# Altium schematic symbol library Altium_Library.SchLib: 822 symbols (part 15 of 17)
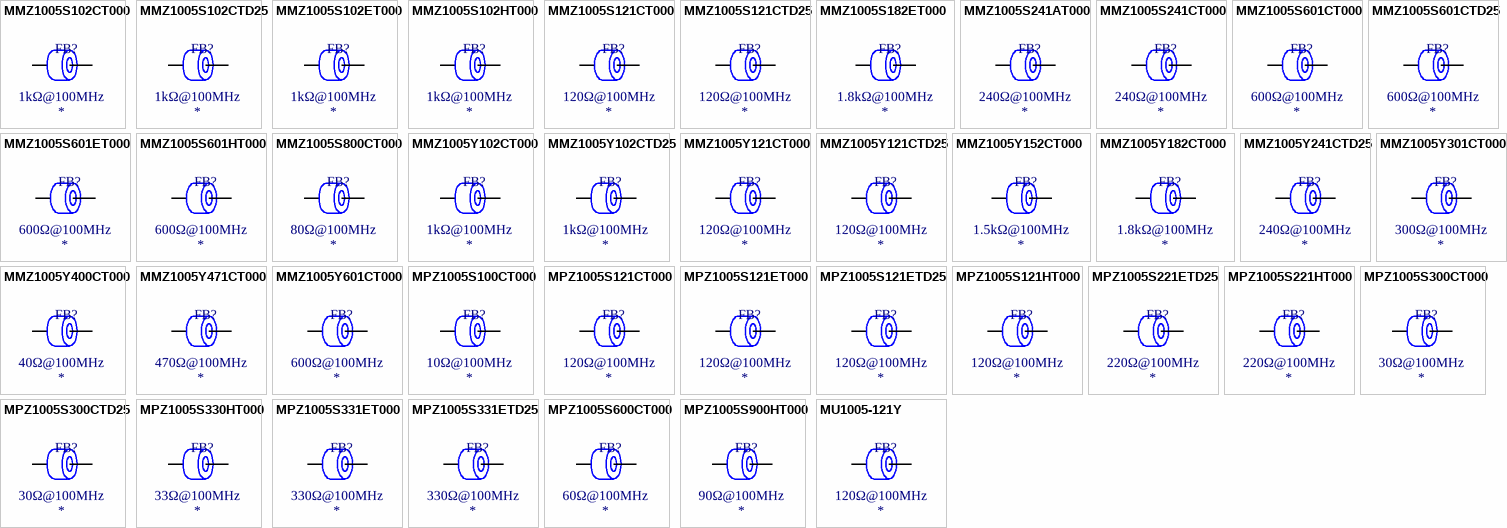
[diagram p34: symbols MMZ1005S102CT000 to MU1005-121Y]

## MMZ1005Y601CT000
designator FB?  Impedance @ Frequency: 600Ω@100MHz
Ferrite, 600Ω@100MHz, ±25%, 540mΩ, 250mA, SMD 0402; Manufacturer: TDK; Manufacturer Part Number: MMZ1005Y601CT000; Package Size: 0402; JLCPCB Basic Part: No; JLCPCB Part Number: C87552; Supplier 1: LCSC; Category: Ferrite Beads; Supplier Part Number 1: C87552; Tolerance: ±25%; Rated Current: 250mA; DC Resistance: 540mΩ; RoHS: Yes; ComponentLink1Description: Datasheet; ComponentLink1URL: https://wmsc.lcsc.com/wmsc/upload/file/pdf/v2/lcsc/2304140030_TDK-MMZ1005Y601CT000_C87552.pdf; ComponentLink2Description: JLCPCB Part URL; ComponentLink2URL: https://jlcpcb.com/partdetail/C87552; ComponentLink3Description: LCSC Part URL; ComponentLink3URL: https://lcsc.com/product-detail/Ferrite-Beads_TDK-TDK-MMZ1005Y601CT000_C87552.html
footprint FB-0402 (0402 (1005M) Ferrite)
pins: 1, 2

## MPZ1005S100CT000
designator FB?  Impedance @ Frequency: 10Ω@100MHz
Ferrite, 10Ω@100MHz, 25mΩ, 3A, SMD 0402; Manufacturer: TDK; Manufacturer Part Number: MPZ1005S100CT000; Package Size: 0402; JLCPCB Basic Part: No; JLCPCB Part Number: C275476; Supplier 1: LCSC; Category: Ferrite Beads; Supplier Part Number 1: C275476; Rated Current: 3A; DC Resistance: 25mΩ; RoHS: Yes; ComponentLink1Description: Datasheet; ComponentLink1URL: https://wmsc.lcsc.com/wmsc/upload/file/pdf/v2/lcsc/2304140030_TDK-MPZ1005S100CT000_C275476.pdf; ComponentLink2Description: JLCPCB Part URL; ComponentLink2URL: https://jlcpcb.com/partdetail/C275476; ComponentLink3Description: LCSC Part URL; ComponentLink3URL: https://lcsc.com/product-detail/Ferrite-Beads_TDK-TDK-MPZ1005S100CT000_C275476.html
footprint FB-0402 (0402 (1005M) Ferrite)
pins: 1, 2

## MPZ1005S121CT000
designator FB?  Impedance @ Frequency: 120Ω@100MHz
Ferrite, 120Ω@100MHz, ±25%, 90mΩ, 1.2A, SMD 0402; Manufacturer: TDK; Manufacturer Part Number: MPZ1005S121CT000; Package Size: 0402; JLCPCB Basic Part: No; JLCPCB Part Number: C107331; Supplier 1: LCSC; Category: Ferrite Beads; Supplier Part Number 1: C107331; Tolerance: ±25%; Rated Current: 1.2A; DC Resistance: 90mΩ; RoHS: Yes; ComponentLink1Description: Datasheet; ComponentLink1URL: https://wmsc.lcsc.com/wmsc/upload/file/pdf/v2/lcsc/2304140030_TDK-MPZ1005S121CT000_C107331.pdf; ComponentLink2Description: JLCPCB Part URL; ComponentLink2URL: https://jlcpcb.com/partdetail/C107331; ComponentLink3Description: LCSC Part URL; ComponentLink3URL: https://lcsc.com/product-detail/Ferrite-Beads_TDK-TDK-MPZ1005S121CT000_C107331.html
footprint FB-0402 (0402 (1005M) Ferrite)
pins: 1, 2

## MPZ1005S121ET000
designator FB?  Impedance @ Frequency: 120Ω@100MHz
Ferrite, 120Ω@100MHz, ±25%, 95mΩ, 1.5A, SMD 0402; Manufacturer: TDK; Manufacturer Part Number: MPZ1005S121ET000; Package Size: 0402; JLCPCB Basic Part: No; JLCPCB Part Number: C275477; Supplier 1: LCSC; Category: Ferrite Beads; Supplier Part Number 1: C275477; Tolerance: ±25%; Rated Current: 1.5A; DC Resistance: 95mΩ; RoHS: Yes; ComponentLink1Description: Datasheet; ComponentLink1URL: https://wmsc.lcsc.com/wmsc/upload/file/pdf/v2/lcsc/1912111437_TDK-MPZ1005S121ET000_C275477.pdf; ComponentLink2Description: JLCPCB Part URL; ComponentLink2URL: https://jlcpcb.com/partdetail/C275477; ComponentLink3Description: LCSC Part URL; ComponentLink3URL: https://lcsc.com/product-detail/Ferrite-Beads_TDK-TDK-MPZ1005S121ET000_C275477.html
footprint FB-0402 (0402 (1005M) Ferrite)
pins: 1, 2

## MPZ1005S121ETD25
designator FB?  Impedance @ Frequency: 120Ω@100MHz
Ferrite, 120Ω@100MHz, ±25%, 95mΩ, 1.5A, SMD 0402; Manufacturer: TDK; Manufacturer Part Number: MPZ1005S121ETD25; Package Size: 0402; JLCPCB Basic Part: No; JLCPCB Part Number: C2661532; Supplier 1: LCSC; Category: Ferrite Beads; Supplier Part Number 1: C2661532; Tolerance: ±25%; Rated Current: 1.5A; DC Resistance: 95mΩ; RoHS: Yes; ComponentLink1Description: Datasheet; ComponentLink1URL: https://wmsc.lcsc.com/wmsc/upload/file/pdf/v2/lcsc/2304140030_TDK-MPZ1005S121ETD25_C2661532.pdf; ComponentLink2Description: JLCPCB Part URL; ComponentLink2URL: https://jlcpcb.com/partdetail/C2661532; ComponentLink3Description: LCSC Part URL; ComponentLink3URL: https://lcsc.com/product-detail/Ferrite-Beads_TDK-TDK-MPZ1005S121ETD25_C2661532.html
footprint FB-0402 (0402 (1005M) Ferrite)
pins: 1, 2

## MPZ1005S121HT000
designator FB?  Impedance @ Frequency: 120Ω@100MHz
Ferrite, 120Ω@100MHz, ±25%, 55mΩ, 2A, SMD 0402; Manufacturer: TDK; Manufacturer Part Number: MPZ1005S121HT000; Package Size: 0402; JLCPCB Basic Part: No; JLCPCB Part Number: C275478; Supplier 1: LCSC; Category: Ferrite Beads; Supplier Part Number 1: C275478; Tolerance: ±25%; Rated Current: 2A; DC Resistance: 55mΩ; RoHS: Yes; ComponentLink1Description: Datasheet; ComponentLink1URL: https://wmsc.lcsc.com/wmsc/upload/file/pdf/v2/lcsc/2304140030_TDK-MPZ1005S121HT000_C275478.pdf; ComponentLink2Description: JLCPCB Part URL; ComponentLink2URL: https://jlcpcb.com/partdetail/C275478; ComponentLink3Description: LCSC Part URL; ComponentLink3URL: https://lcsc.com/product-detail/Ferrite-Beads_TDK-TDK-MPZ1005S121HT000_C275478.html
footprint FB-0402 (0402 (1005M) Ferrite)
pins: 1, 2

## MPZ1005S221ETD25
designator FB?  Impedance @ Frequency: 220Ω@100MHz
Ferrite, 220Ω@100MHz, ±25%, 220mΩ, 900mA, SMD 0402; Manufacturer: TDK; Manufacturer Part Number: MPZ1005S221ETD25; Package Size: 0402; JLCPCB Basic Part: No; JLCPCB Part Number: C165810; Supplier 1: LCSC; Category: Ferrite Beads; Supplier Part Number 1: C165810; Tolerance: ±25%; Rated Current: 900mA; DC Resistance: 220mΩ; RoHS: Yes; ComponentLink1Description: Datasheet; ComponentLink1URL: https://wmsc.lcsc.com/wmsc/upload/file/pdf/v2/lcsc/1809051019_TDK-MPZ1005S221ETD25_C165810.pdf; ComponentLink2Description: JLCPCB Part URL; ComponentLink2URL: https://jlcpcb.com/partdetail/C165810; ComponentLink3Description: LCSC Part URL; ComponentLink3URL: https://lcsc.com/product-detail/Ferrite-Beads_TDK-TDK-MPZ1005S221ETD25_C165810.html
footprint FB-0402 (0402 (1005M) Ferrite)
pins: 1, 2

## MPZ1005S221HT000
designator FB?  Impedance @ Frequency: 220Ω@100MHz
Ferrite, 220Ω@100MHz, ±25%, 95mΩ, 1.5A, SMD 0402; Manufacturer: TDK; Manufacturer Part Number: MPZ1005S221HT000; Package Size: 0402; JLCPCB Basic Part: No; JLCPCB Part Number: C1870222; Supplier 1: LCSC; Category: Ferrite Beads; Supplier Part Number 1: C1870222; Tolerance: ±25%; Rated Current: 1.5A; DC Resistance: 95mΩ; RoHS: Yes; ComponentLink1Description: Datasheet; ComponentLink1URL: https://wmsc.lcsc.com/wmsc/upload/file/pdf/v2/lcsc/2201272330_TDK-MPZ1005S221HT000_C1870222.pdf; ComponentLink2Description: JLCPCB Part URL; ComponentLink2URL: https://jlcpcb.com/partdetail/C1870222; ComponentLink3Description: LCSC Part URL; ComponentLink3URL: https://lcsc.com/product-detail/Ferrite-Beads_TDK-TDK-MPZ1005S221HT000_C1870222.html
footprint FB-0402 (0402 (1005M) Ferrite)
pins: 1, 2

## MPZ1005S300CT000
designator FB?  Impedance @ Frequency: 30Ω@100MHz
Ferrite, 30Ω@100MHz, 35mΩ, 1.7A, SMD 0402; Manufacturer: TDK; Manufacturer Part Number: MPZ1005S300CT000; Package Size: 0402; JLCPCB Basic Part: No; JLCPCB Part Number: C275480; Supplier 1: LCSC; Category: Ferrite Beads; Supplier Part Number 1: C275480; Rated Current: 1.7A; DC Resistance: 35mΩ; RoHS: Yes; ComponentLink1Description: Datasheet; ComponentLink1URL: https://wmsc.lcsc.com/wmsc/upload/file/pdf/v2/lcsc/1810311724_TDK-MPZ1005S300CT000_C275480.pdf; ComponentLink2Description: JLCPCB Part URL; ComponentLink2URL: https://jlcpcb.com/partdetail/C275480; ComponentLink3Description: LCSC Part URL; ComponentLink3URL: https://lcsc.com/product-detail/Ferrite-Beads_TDK-TDK-MPZ1005S300CT000_C275480.html
footprint FB-0402 (0402 (1005M) Ferrite)
pins: 1, 2

## MPZ1005S300CTD25
designator FB?  Impedance @ Frequency: 30Ω@100MHz
Ferrite, 30Ω@100MHz, 35mΩ, 1.7A, SMD 0402; Manufacturer: TDK; Manufacturer Part Number: MPZ1005S300CTD25; Package Size: 0402; JLCPCB Basic Part: No; JLCPCB Part Number: C404686; Supplier 1: LCSC; Category: Ferrite Beads; Supplier Part Number 1: C404686; Rated Current: 1.7A; DC Resistance: 35mΩ; RoHS: Yes; ComponentLink1Description: Datasheet; ComponentLink1URL: https://wmsc.lcsc.com/wmsc/upload/file/pdf/v2/lcsc/2304140030_TDK-MPZ1005S300CTD25_C404686.pdf; ComponentLink2Description: JLCPCB Part URL; ComponentLink2URL: https://jlcpcb.com/partdetail/C404686; ComponentLink3Description: LCSC Part URL; ComponentLink3URL: https://lcsc.com/product-detail/Ferrite-Beads_TDK-TDK-MPZ1005S300CTD25_C404686.html
footprint FB-0402 (0402 (1005M) Ferrite)
pins: 1, 2

## MPZ1005S330HT000
designator FB?  Impedance @ Frequency: 33Ω@100MHz
Ferrite, 33Ω@100MHz, ±25%, 22mΩ, 3A, SMD 0402; Manufacturer: TDK; Manufacturer Part Number: MPZ1005S330HT000; Package Size: 0402; JLCPCB Basic Part: No; JLCPCB Part Number: C434836; Supplier 1: LCSC; Category: Ferrite Beads; Supplier Part Number 1: C434836; Tolerance: ±25%; Rated Current: 3A; DC Resistance: 22mΩ; RoHS: Yes; ComponentLink1Description: Datasheet; ComponentLink1URL: https://wmsc.lcsc.com/wmsc/upload/file/pdf/v2/lcsc/2304140030_TDK-MPZ1005S330HT000_C434836.pdf; ComponentLink2Description: JLCPCB Part URL; ComponentLink2URL: https://jlcpcb.com/partdetail/C434836; ComponentLink3Description: LCSC Part URL; ComponentLink3URL: https://lcsc.com/product-detail/Ferrite-Beads_TDK-TDK-MPZ1005S330HT000_C434836.html
footprint FB-0402 (0402 (1005M) Ferrite)
pins: 1, 2

## MPZ1005S331ET000
designator FB?  Impedance @ Frequency: 330Ω@100MHz
Ferrite, 330Ω@100MHz, ±25%, 280mΩ, 700mA, SMD 0402; Manufacturer: TDK; Manufacturer Part Number: MPZ1005S331ET000; Package Size: 0402; JLCPCB Basic Part: No; JLCPCB Part Number: C275481; Supplier 1: LCSC; Category: Ferrite Beads; Supplier Part Number 1: C275481; Tolerance: ±25%; Rated Current: 700mA; DC Resistance: 280mΩ; RoHS: Yes; ComponentLink1Description: Datasheet; ComponentLink1URL: https://wmsc.lcsc.com/wmsc/upload/file/pdf/v2/lcsc/2304140030_TDK-MPZ1005S331ET000_C275481.pdf; ComponentLink2Description: JLCPCB Part URL; ComponentLink2URL: https://jlcpcb.com/partdetail/C275481; ComponentLink3Description: LCSC Part URL; ComponentLink3URL: https://lcsc.com/product-detail/Ferrite-Beads_TDK-TDK-MPZ1005S331ET000_C275481.html
footprint FB-0402 (0402 (1005M) Ferrite)
pins: 1, 2

## MPZ1005S331ETD25
designator FB?  Impedance @ Frequency: 330Ω@100MHz
Ferrite, 330Ω@100MHz, 280mΩ, 700mA, SMD 0402; Manufacturer: TDK; Manufacturer Part Number: MPZ1005S331ETD25; Package Size: 0402; JLCPCB Basic Part: No; JLCPCB Part Number: C445756; Supplier 1: LCSC; Category: Ferrite Beads; Supplier Part Number 1: C445756; Rated Current: 700mA; DC Resistance: 280mΩ; RoHS: Yes; ComponentLink1Description: Datasheet; ComponentLink1URL: https://wmsc.lcsc.com/wmsc/upload/file/pdf/v2/lcsc/2304140030_TDK-MPZ1005S331ETD25_C445756.pdf; ComponentLink2Description: JLCPCB Part URL; ComponentLink2URL: https://jlcpcb.com/partdetail/C445756; ComponentLink3Description: LCSC Part URL; ComponentLink3URL: https://lcsc.com/product-detail/Ferrite-Beads_TDK-TDK-MPZ1005S331ETD25_C445756.html
footprint FB-0402 (0402 (1005M) Ferrite)
pins: 1, 2

## MPZ1005S600CT000
designator FB?  Impedance @ Frequency: 60Ω@100MHz
Ferrite, 60Ω@100MHz, ±25%, 60mΩ, 1.5A, SMD 0402; Manufacturer: TDK; Manufacturer Part Number: MPZ1005S600CT000; Package Size: 0402; JLCPCB Basic Part: No; JLCPCB Part Number: C76813; Supplier 1: LCSC; Category: Ferrite Beads; Supplier Part Number 1: C76813; Tolerance: ±25%; Rated Current: 1.5A; DC Resistance: 60mΩ; RoHS: Yes; ComponentLink1Description: Datasheet; ComponentLink1URL: https://wmsc.lcsc.com/wmsc/upload/file/pdf/v2/lcsc/1809051318_TDK-MPZ1005S600CT000_C76813.pdf; ComponentLink2Description: JLCPCB Part URL; ComponentLink2URL: https://jlcpcb.com/partdetail/C76813; ComponentLink3Description: LCSC Part URL; ComponentLink3URL: https://lcsc.com/product-detail/Ferrite-Beads_TDK-TDK-MPZ1005S600CT000_C76813.html
footprint FB-0402 (0402 (1005M) Ferrite)
pins: 1, 2

## MPZ1005S900HT000
designator FB?  Impedance @ Frequency: 90Ω@100MHz
Ferrite, 90Ω@100MHz, ±25%, 38mΩ, 2.3A, SMD 0402; Manufacturer: TDK; Manufacturer Part Number: MPZ1005S900HT000; Package Size: 0402; JLCPCB Basic Part: No; JLCPCB Part Number: C524454; Supplier 1: LCSC; Category: Ferrite Beads; Supplier Part Number 1: C524454; Tolerance: ±25%; Rated Current: 2.3A; DC Resistance: 38mΩ; RoHS: Yes; ComponentLink1Description: Datasheet; ComponentLink1URL: https://wmsc.lcsc.com/wmsc/upload/file/pdf/v2/lcsc/2007171235_TDK-MPZ1005S900HT000_C524454.pdf; ComponentLink2Description: JLCPCB Part URL; ComponentLink2URL: https://jlcpcb.com/partdetail/C524454; ComponentLink3Description: LCSC Part URL; ComponentLink3URL: https://lcsc.com/product-detail/Ferrite-Beads_TDK-TDK-MPZ1005S900HT000_C524454.html
footprint FB-0402 (0402 (1005M) Ferrite)
pins: 1, 2

## MU1005-121Y
designator FB?  Impedance @ Frequency: 120Ω@100MHz
Ferrite, 120Ω@100MHz, ±25%, 0.3Ω, 100mA, SMD 0402; Manufacturer: BOURNS; Manufacturer Part Number: MU1005-121Y; Package Size: 0402; JLCPCB Basic Part: No; JLCPCB Part Number: C139465; Supplier 1: LCSC; Category: Ferrite Beads; Supplier Part Number 1: C139465; Tolerance: ±25%; Rated Current: 100mA; DC Resistance: 0.3Ω; RoHS: Yes; ComponentLink1Description: Datasheet; ComponentLink1URL: https://wmsc.lcsc.com/wmsc/upload/file/pdf/v2/lcsc/2304140030_BOURNS-MU1005-121Y_C139465.pdf; ComponentLink2Description: JLCPCB Part URL; ComponentLink2URL: https://jlcpcb.com/partdetail/C139465; ComponentLink3Description: LCSC Part URL; ComponentLink3URL: https://lcsc.com/product-detail/Ferrite-Beads_BOURNS-BOURNS-MU1005-121Y_C139465.html
footprint FB-0402 (0402 (1005M) Ferrite)
pins: 1, 2

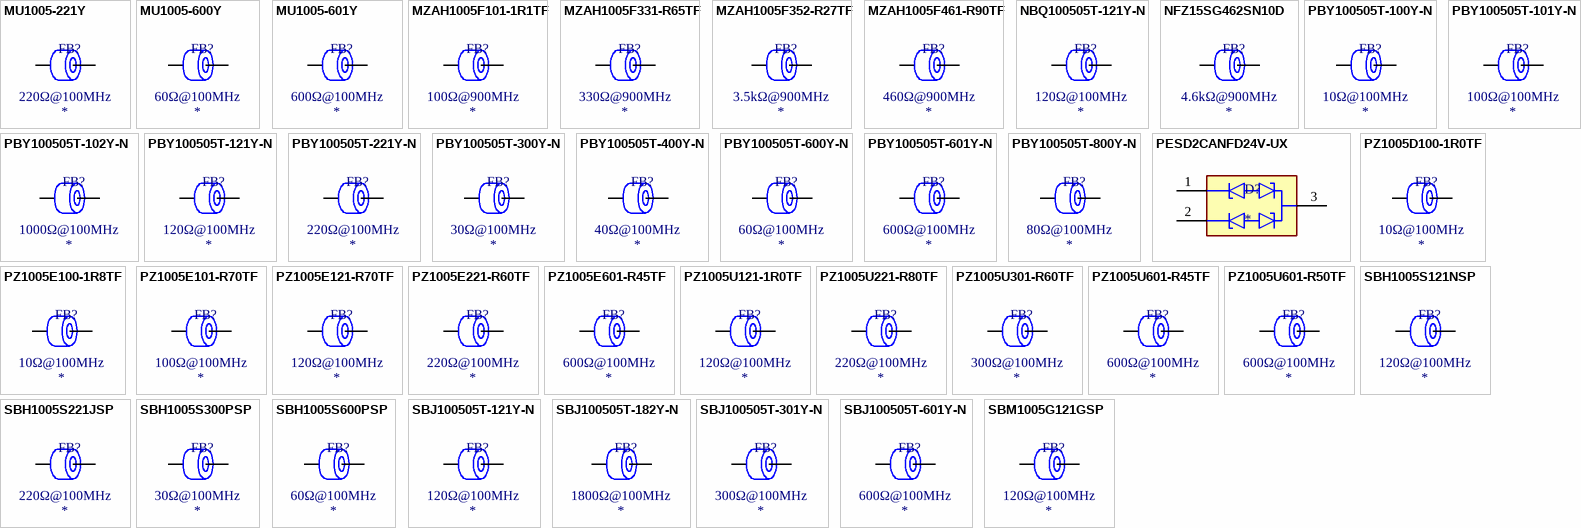
[diagram p18: symbols MU1005-221Y to SBM1005G121GSP]

## MU1005-221Y
designator FB?  Impedance @ Frequency: 220Ω@100MHz
Ferrite, 220Ω@100MHz, ±25%, 0.4Ω, 100mA, SMD 0402; Manufacturer: BOURNS; Manufacturer Part Number: MU1005-221Y; Package Size: 0402; JLCPCB Basic Part: No; JLCPCB Part Number: C139466; Supplier 1: LCSC; Category: Ferrite Beads; Supplier Part Number 1: C139466; Tolerance: ±25%; Rated Current: 100mA; DC Resistance: 0.4Ω; RoHS: Yes; ComponentLink1Description: Datasheet; ComponentLink1URL: https://wmsc.lcsc.com/wmsc/upload/file/pdf/v2/lcsc/2304140030_BOURNS-MU1005-221Y_C139466.pdf; ComponentLink2Description: JLCPCB Part URL; ComponentLink2URL: https://jlcpcb.com/partdetail/C139466; ComponentLink3Description: LCSC Part URL; ComponentLink3URL: https://lcsc.com/product-detail/Ferrite-Beads_BOURNS-BOURNS-MU1005-221Y_C139466.html
footprint FB-0402 (0402 (1005M) Ferrite)
pins: 1, 2

## MU1005-600Y
designator FB?  Impedance @ Frequency: 60Ω@100MHz
Ferrite, 60Ω@100MHz, ±25%, 0.25Ω, 300mA, SMD 0402; Manufacturer: BOURNS; Manufacturer Part Number: MU1005-600Y; Package Size: 0402; JLCPCB Basic Part: No; JLCPCB Part Number: C139468; Supplier 1: LCSC; Category: Ferrite Beads; Supplier Part Number 1: C139468; Tolerance: ±25%; Rated Current: 300mA; DC Resistance: 0.25Ω; RoHS: Yes; ComponentLink1Description: Datasheet; ComponentLink1URL: https://wmsc.lcsc.com/wmsc/upload/file/pdf/v2/lcsc/2304140030_BOURNS-MU1005-600Y_C139468.pdf; ComponentLink2Description: JLCPCB Part URL; ComponentLink2URL: https://jlcpcb.com/partdetail/C139468; ComponentLink3Description: LCSC Part URL; ComponentLink3URL: https://lcsc.com/product-detail/Ferrite-Beads_BOURNS-BOURNS-MU1005-600Y_C139468.html
footprint FB-0402 (0402 (1005M) Ferrite)
pins: 1, 2

## MU1005-601Y
designator FB?  Impedance @ Frequency: 600Ω@100MHz
Ferrite, 600Ω@100MHz, ±25%, 0.8Ω, 80mA, SMD 0402; Manufacturer: BOURNS; Manufacturer Part Number: MU1005-601Y; Package Size: 0402; JLCPCB Basic Part: No; JLCPCB Part Number: C139469; Supplier 1: LCSC; Category: Ferrite Beads; Supplier Part Number 1: C139469; Tolerance: ±25%; Rated Current: 80mA; DC Resistance: 0.8Ω; RoHS: Yes; ComponentLink1Description: Datasheet; ComponentLink1URL: https://wmsc.lcsc.com/wmsc/upload/file/pdf/v2/lcsc/2304140030_BOURNS-MU1005-601Y_C139469.pdf; ComponentLink2Description: JLCPCB Part URL; ComponentLink2URL: https://jlcpcb.com/partdetail/C139469; ComponentLink3Description: LCSC Part URL; ComponentLink3URL: https://lcsc.com/product-detail/Ferrite-Beads_BOURNS-BOURNS-MU1005-601Y_C139469.html
footprint FB-0402 (0402 (1005M) Ferrite)
pins: 1, 2

## MZAH1005F101-1R1TF
designator FB?  Impedance @ Frequency: 100Ω@900MHz
Ferrite, 100Ω@900MHz, ±25%, 100mΩ, 1.1A, SMD 0402; Manufacturer: Sunlord; Manufacturer Part Number: MZAH1005F101-1R1TF; Package Size: 0402; JLCPCB Basic Part: No; JLCPCB Part Number: C370052; Supplier 1: LCSC; Category: Ferrite Beads; Supplier Part Number 1: C370052; Tolerance: ±25%; Rated Current: 1.1A; DC Resistance: 100mΩ; RoHS: Yes; ComponentLink1Description: Datasheet; ComponentLink1URL: https://wmsc.lcsc.com/wmsc/upload/file/pdf/v2/lcsc/2310301519_Sunlord-MZAH1005F101-1R1TF_C370052.pdf; ComponentLink2Description: JLCPCB Part URL; ComponentLink2URL: https://jlcpcb.com/partdetail/C370052; ComponentLink3Description: LCSC Part URL; ComponentLink3URL: https://lcsc.com/product-detail/Ferrite-Beads_Sunlord-Sunlord-MZAH1005F101-1R1TF_C370052.html
footprint FB-0402 (0402 (1005M) Ferrite)
pins: 1, 2

## MZAH1005F331-R65TF
designator FB?  Impedance @ Frequency: 330Ω@900MHz
Ferrite, 330Ω@900MHz, ±25%, 300mΩ, 650mA, SMD 0402; Manufacturer: Sunlord; Manufacturer Part Number: MZAH1005F331-R65TF; Package Size: 0402; JLCPCB Basic Part: No; JLCPCB Part Number: C709647; Supplier 1: LCSC; Category: Ferrite Beads; Supplier Part Number 1: C709647; Tolerance: ±25%; Rated Current: 650mA; DC Resistance: 300mΩ; RoHS: Yes; ComponentLink1Description: Datasheet; ComponentLink1URL: https://wmsc.lcsc.com/wmsc/upload/file/pdf/v2/lcsc/2310301640_Sunlord-MZAH1005F331-R65TF_C709647.pdf; ComponentLink2Description: JLCPCB Part URL; ComponentLink2URL: https://jlcpcb.com/partdetail/C709647; ComponentLink3Description: LCSC Part URL; ComponentLink3URL: https://lcsc.com/product-detail/Ferrite-Beads_Sunlord-Sunlord-MZAH1005F331-R65TF_C709647.html
footprint FB-0402 (0402 (1005M) Ferrite)
pins: 1, 2

## MZAH1005F352-R27TF
designator FB?  Impedance @ Frequency: 3.5kΩ@900MHz
Ferrite, 3.5kΩ@900MHz, ±25%, 1.35Ω, 270mA, SMD 0402; Manufacturer: Sunlord; Manufacturer Part Number: MZAH1005F352-R27TF; Package Size: 0402; JLCPCB Basic Part: No; JLCPCB Part Number: C709651; Supplier 1: LCSC; Category: Ferrite Beads; Supplier Part Number 1: C709651; Tolerance: ±25%; Rated Current: 270mA; DC Resistance: 1.35Ω; RoHS: Yes; ComponentLink1Description: Datasheet; ComponentLink1URL: https://wmsc.lcsc.com/wmsc/upload/file/pdf/v2/lcsc/2310301640_Sunlord-MZAH1005F352-R27TF_C709651.pdf; ComponentLink2Description: JLCPCB Part URL; ComponentLink2URL: https://jlcpcb.com/partdetail/C709651; ComponentLink3Description: LCSC Part URL; ComponentLink3URL: https://lcsc.com/product-detail/Ferrite-Beads_Sunlord-Sunlord-MZAH1005F352-R27TF_C709651.html
footprint FB-0402 (0402 (1005M) Ferrite)
pins: 1, 2

## MZAH1005F461-R90TF
designator FB?  Impedance @ Frequency: 460Ω@900MHz
Ferrite, 460Ω@900MHz, ±25%, 170mΩ, 900mA, SMD 0402; Manufacturer: Sunlord; Manufacturer Part Number: MZAH1005F461-R90TF; Package Size: 0402; JLCPCB Basic Part: No; JLCPCB Part Number: C709648; Supplier 1: LCSC; Category: Ferrite Beads; Supplier Part Number 1: C709648; Tolerance: ±25%; Rated Current: 900mA; DC Resistance: 170mΩ; RoHS: Yes; ComponentLink1Description: Datasheet; ComponentLink1URL: https://wmsc.lcsc.com/wmsc/upload/file/pdf/v2/lcsc/2310301640_Sunlord-MZAH1005F461-R90TF_C709648.pdf; ComponentLink2Description: JLCPCB Part URL; ComponentLink2URL: https://jlcpcb.com/partdetail/C709648; ComponentLink3Description: LCSC Part URL; ComponentLink3URL: https://lcsc.com/product-detail/Ferrite-Beads_Sunlord-Sunlord-MZAH1005F461-R90TF_C709648.html
footprint FB-0402 (0402 (1005M) Ferrite)
pins: 1, 2

## NBQ100505T-121Y-N
designator FB?  Impedance @ Frequency: 120Ω@100MHz
Ferrite, 120Ω@100MHz, ±25%, 0.4Ω, 350mA, SMD 0402; Manufacturer: Chilisin Elec; Manufacturer Part Number: NBQ100505T-121Y-N; Package Size: 0402; JLCPCB Basic Part: No; JLCPCB Part Number: C285681; Supplier 1: LCSC; Category: Ferrite Beads; Supplier Part Number 1: C285681; Tolerance: ±25%; Rated Current: 350mA; DC Resistance: 0.4Ω; RoHS: Yes; ComponentLink1Description: Datasheet; ComponentLink1URL: https://wmsc.lcsc.com/wmsc/upload/file/pdf/v2/lcsc/1912111437_Chilisin-Elec-NBQ100505T-121Y-N_C285681.pdf; ComponentLink2Description: JLCPCB Part URL; ComponentLink2URL: https://jlcpcb.com/partdetail/C285681; ComponentLink3Description: LCSC Part URL; ComponentLink3URL: https://lcsc.com/product-detail/Ferrite-Beads_Chilisin-Elec-Chilisin-Elec-NBQ100505T-121Y-N_C285681.html
footprint FB-0402 (0402 (1005M) Ferrite)
pins: 1, 2

## NFZ15SG462SN10D
designator FB?  Impedance @ Frequency: 4.6kΩ@900MHz
Ferrite, 4.6kΩ@900MHz, 1.65Ω, 270mA, SMD 0402; Manufacturer: Murata Electronics; Manufacturer Part Number: NFZ15SG462SN10D; Package Size: 0402; JLCPCB Basic Part: No; JLCPCB Part Number: C237605; Supplier 1: LCSC; Category: Ferrite Beads; Supplier Part Number 1: C237605; Rated Current: 270mA; DC Resistance: 1.65Ω; RoHS: Yes; ComponentLink1Description: Datasheet; ComponentLink1URL: https://wmsc.lcsc.com/wmsc/upload/file/pdf/v2/lcsc/2304140030_Murata-Electronics-NFZ15SG462SN10D_C237605.pdf; ComponentLink2Description: JLCPCB Part URL; ComponentLink2URL: https://jlcpcb.com/partdetail/C237605; ComponentLink3Description: LCSC Part URL; ComponentLink3URL: https://lcsc.com/product-detail/Ferrite-Beads_Murata-Electronics-Murata-Electronics-NFZ15SG462SN10D_C237605.html
footprint FB-0402 (0402 (1005M) Ferrite)
pins: 1, 2

## PBY100505T-100Y-N
designator FB?  Impedance @ Frequency: 10Ω@100MHz
Ferrite, 10Ω@100MHz, ±25%, 0.03Ω, 2000mA, SMD 0402; Manufacturer: Chilisin Elec; Manufacturer Part Number: PBY100505T-100Y-N; Package Size: 0402; JLCPCB Basic Part: No; JLCPCB Part Number: C142088; Supplier 1: LCSC; Category: Ferrite Beads; Supplier Part Number 1: C142088; Tolerance: ±25%; Rated Current: 2000mA; DC Resistance: 0.03Ω; RoHS: Yes; ComponentLink1Description: Datasheet; ComponentLink1URL: https://wmsc.lcsc.com/wmsc/upload/file/pdf/v2/lcsc/2304140030_Chilisin-Elec-PBY100505T-100Y-N_C142088.pdf; ComponentLink2Description: JLCPCB Part URL; ComponentLink2URL: https://jlcpcb.com/partdetail/C142088; ComponentLink3Description: LCSC Part URL; ComponentLink3URL: https://lcsc.com/product-detail/Ferrite-Beads_Chilisin-Elec-Chilisin-Elec-PBY100505T-100Y-N_C142088.html
footprint FB-0402 (0402 (1005M) Ferrite)
pins: 1, 2

## PBY100505T-101Y-N
designator FB?  Impedance @ Frequency: 100Ω@100MHz
Ferrite, 100Ω@100MHz, ±25%, 0.09Ω, 1200mA, SMD 0402; Manufacturer: Chilisin Elec; Manufacturer Part Number: PBY100505T-101Y-N; Package Size: 0402; JLCPCB Basic Part: No; JLCPCB Part Number: C142087; Supplier 1: LCSC; Category: Ferrite Beads; Supplier Part Number 1: C142087; Tolerance: ±25%; Rated Current: 1200mA; DC Resistance: 0.09Ω; RoHS: Yes; ComponentLink1Description: Datasheet; ComponentLink1URL: https://wmsc.lcsc.com/wmsc/upload/file/pdf/v2/lcsc/2304140030_Chilisin-Elec-PBY100505T-101Y-N_C142087.pdf; ComponentLink2Description: JLCPCB Part URL; ComponentLink2URL: https://jlcpcb.com/partdetail/C142087; ComponentLink3Description: LCSC Part URL; ComponentLink3URL: https://lcsc.com/product-detail/Ferrite-Beads_Chilisin-Elec-Chilisin-Elec-PBY100505T-101Y-N_C142087.html
footprint FB-0402 (0402 (1005M) Ferrite)
pins: 1, 2

## PBY100505T-102Y-N
designator FB?  Impedance @ Frequency: 1000Ω@100MHz
Ferrite, 1000Ω@100MHz, ±25%, 0.49Ω, 500mA, SMD 0402; Manufacturer: Chilisin Elec; Manufacturer Part Number: PBY100505T-102Y-N; Package Size: 0402; JLCPCB Basic Part: No; JLCPCB Part Number: C142086; Supplier 1: LCSC; Category: Ferrite Beads; Supplier Part Number 1: C142086; Tolerance: ±25%; Rated Current: 500mA; DC Resistance: 0.49Ω; RoHS: Yes; ComponentLink1Description: Datasheet; ComponentLink1URL: https://wmsc.lcsc.com/wmsc/upload/file/pdf/v2/lcsc/2304140030_Chilisin-Elec-PBY100505T-102Y-N_C142086.pdf; ComponentLink2Description: JLCPCB Part URL; ComponentLink2URL: https://jlcpcb.com/partdetail/C142086; ComponentLink3Description: LCSC Part URL; ComponentLink3URL: https://lcsc.com/product-detail/Ferrite-Beads_Chilisin-Elec-Chilisin-Elec-PBY100505T-102Y-N_C142086.html
footprint FB-0402 (0402 (1005M) Ferrite)
pins: 1, 2

## PBY100505T-121Y-N
designator FB?  Impedance @ Frequency: 120Ω@100MHz
Ferrite, 120Ω@100MHz, ±25%, 0.09Ω, 1400mA, SMD 0402; Manufacturer: Chilisin Elec; Manufacturer Part Number: PBY100505T-121Y-N; Package Size: 0402; JLCPCB Basic Part: No; JLCPCB Part Number: C108297; Supplier 1: LCSC; Category: Ferrite Beads; Supplier Part Number 1: C108297; Tolerance: ±25%; Rated Current: 1400mA; DC Resistance: 0.09Ω; RoHS: Yes; ComponentLink1Description: Datasheet; ComponentLink1URL: https://wmsc.lcsc.com/wmsc/upload/file/pdf/v2/lcsc/2304140030_Chilisin-Elec-PBY100505T-121Y-N_C108297.pdf; ComponentLink2Description: JLCPCB Part URL; ComponentLink2URL: https://jlcpcb.com/partdetail/C108297; ComponentLink3Description: LCSC Part URL; ComponentLink3URL: https://lcsc.com/product-detail/Ferrite-Beads_Chilisin-Elec-Chilisin-Elec-PBY100505T-121Y-N_C108297.html
footprint FB-0402 (0402 (1005M) Ferrite)
pins: 1, 2

## PBY100505T-221Y-N
designator FB?  Impedance @ Frequency: 220Ω@100MHz
Ferrite, 220Ω@100MHz, ±25%, 0.18Ω, 1100mA, SMD 0402; Manufacturer: Chilisin Elec; Manufacturer Part Number: PBY100505T-221Y-N; Package Size: 0402; JLCPCB Basic Part: No; JLCPCB Part Number: C142085; Supplier 1: LCSC; Category: Ferrite Beads; Supplier Part Number 1: C142085; Tolerance: ±25%; Rated Current: 1100mA; DC Resistance: 0.18Ω; RoHS: Yes; ComponentLink1Description: Datasheet; ComponentLink1URL: https://wmsc.lcsc.com/wmsc/upload/file/pdf/v2/lcsc/2304140030_Chilisin-Elec-PBY100505T-221Y-N_C142085.pdf; ComponentLink2Description: JLCPCB Part URL; ComponentLink2URL: https://jlcpcb.com/partdetail/C142085; ComponentLink3Description: LCSC Part URL; ComponentLink3URL: https://lcsc.com/product-detail/Ferrite-Beads_Chilisin-Elec-Chilisin-Elec-PBY100505T-221Y-N_C142085.html
footprint FB-0402 (0402 (1005M) Ferrite)
pins: 1, 2

## PBY100505T-300Y-N
designator FB?  Impedance @ Frequency: 30Ω@100MHz
Ferrite, 30Ω@100MHz, ±25%, 0.05Ω, 1700mA, SMD 0402; Manufacturer: Chilisin Elec; Manufacturer Part Number: PBY100505T-300Y-N; Package Size: 0402; JLCPCB Basic Part: No; JLCPCB Part Number: C142084; Supplier 1: LCSC; Category: Ferrite Beads; Supplier Part Number 1: C142084; Tolerance: ±25%; Rated Current: 1700mA; DC Resistance: 0.05Ω; RoHS: Yes; ComponentLink1Description: Datasheet; ComponentLink1URL: https://wmsc.lcsc.com/wmsc/upload/file/pdf/v2/lcsc/2304140030_Chilisin-Elec-PBY100505T-300Y-N_C142084.pdf; ComponentLink2Description: JLCPCB Part URL; ComponentLink2URL: https://jlcpcb.com/partdetail/C142084; ComponentLink3Description: LCSC Part URL; ComponentLink3URL: https://lcsc.com/product-detail/Ferrite-Beads_Chilisin-Elec-Chilisin-Elec-PBY100505T-300Y-N_C142084.html
footprint FB-0402 (0402 (1005M) Ferrite)
pins: 1, 2

## PBY100505T-400Y-N
designator FB?  Impedance @ Frequency: 40Ω@100MHz
Ferrite, 40Ω@100MHz, ±25%, 0.075Ω, 1500mA, SMD 0402; Manufacturer: Chilisin Elec; Manufacturer Part Number: PBY100505T-400Y-N; Package Size: 0402; JLCPCB Basic Part: No; JLCPCB Part Number: C365831; Supplier 1: LCSC; Category: Ferrite Beads; Supplier Part Number 1: C365831; Tolerance: ±25%; Rated Current: 1500mA; DC Resistance: 0.075Ω; RoHS: Yes; ComponentLink1Description: Datasheet; ComponentLink1URL: https://wmsc.lcsc.com/wmsc/upload/file/pdf/v2/lcsc/2304140030_Chilisin-Elec-PBY100505T-400Y-N_C365831.pdf; ComponentLink2Description: JLCPCB Part URL; ComponentLink2URL: https://jlcpcb.com/partdetail/C365831; ComponentLink3Description: LCSC Part URL; ComponentLink3URL: https://lcsc.com/product-detail/Ferrite-Beads_Chilisin-Elec-Chilisin-Elec-PBY100505T-400Y-N_C365831.html
footprint FB-0402 (0402 (1005M) Ferrite)
pins: 1, 2

## PBY100505T-600Y-N
designator FB?  Impedance @ Frequency: 60Ω@100MHz
Ferrite, 60Ω@100MHz, ±25%, 0.075Ω, 1500mA, SMD 0402; Manufacturer: Chilisin Elec; Manufacturer Part Number: PBY100505T-600Y-N; Package Size: 0402; JLCPCB Basic Part: No; JLCPCB Part Number: C142083; Supplier 1: LCSC; Category: Ferrite Beads; Supplier Part Number 1: C142083; Tolerance: ±25%; Rated Current: 1500mA; DC Resistance: 0.075Ω; RoHS: Yes; ComponentLink1Description: Datasheet; ComponentLink1URL: https://wmsc.lcsc.com/wmsc/upload/file/pdf/v2/lcsc/2304140030_Chilisin-Elec-PBY100505T-600Y-N_C142083.pdf; ComponentLink2Description: JLCPCB Part URL; ComponentLink2URL: https://jlcpcb.com/partdetail/C142083; ComponentLink3Description: LCSC Part URL; ComponentLink3URL: https://lcsc.com/product-detail/Ferrite-Beads_Chilisin-Elec-Chilisin-Elec-PBY100505T-600Y-N_C142083.html
footprint FB-0402 (0402 (1005M) Ferrite)
pins: 1, 2

## PBY100505T-601Y-N
designator FB?  Impedance @ Frequency: 600Ω@100MHz
Ferrite, 600Ω@100MHz, ±25%, 0.34Ω, 700mA, SMD 0402; Manufacturer: Chilisin Elec; Manufacturer Part Number: PBY100505T-601Y-N; Package Size: 0402; JLCPCB Basic Part: No; JLCPCB Part Number: C142082; Supplier 1: LCSC; Category: Ferrite Beads; Supplier Part Number 1: C142082; Tolerance: ±25%; Rated Current: 700mA; DC Resistance: 0.34Ω; RoHS: Yes; ComponentLink1Description: Datasheet; ComponentLink1URL: https://wmsc.lcsc.com/wmsc/upload/file/pdf/v2/lcsc/2304140030_Chilisin-Elec-PBY100505T-601Y-N_C142082.pdf; ComponentLink2Description: JLCPCB Part URL; ComponentLink2URL: https://jlcpcb.com/partdetail/C142082; ComponentLink3Description: LCSC Part URL; ComponentLink3URL: https://lcsc.com/product-detail/Ferrite-Beads_Chilisin-Elec-Chilisin-Elec-PBY100505T-601Y-N_C142082.html
footprint FB-0402 (0402 (1005M) Ferrite)
pins: 1, 2

## PBY100505T-800Y-N
designator FB?  Impedance @ Frequency: 80Ω@100MHz
Ferrite, 80Ω@100MHz, ±25%, 0.09Ω, 1200mA, SMD 0402; Manufacturer: Chilisin Elec; Manufacturer Part Number: PBY100505T-800Y-N; Package Size: 0402; JLCPCB Basic Part: No; JLCPCB Part Number: C365825; Supplier 1: LCSC; Category: Ferrite Beads; Supplier Part Number 1: C365825; Tolerance: ±25%; Rated Current: 1200mA; DC Resistance: 0.09Ω; RoHS: Yes; ComponentLink1Description: Datasheet; ComponentLink1URL: https://wmsc.lcsc.com/wmsc/upload/file/pdf/v2/lcsc/2304140030_Chilisin-Elec-PBY100505T-800Y-N_C365825.pdf; ComponentLink2Description: JLCPCB Part URL; ComponentLink2URL: https://jlcpcb.com/partdetail/C365825; ComponentLink3Description: LCSC Part URL; ComponentLink3URL: https://lcsc.com/product-detail/Ferrite-Beads_Chilisin-Elec-Chilisin-Elec-PBY100505T-800Y-N_C365825.html
footprint FB-0402 (0402 (1005M) Ferrite)
pins: 1, 2

## PESD2CANFD24V-UX
designator D?
ESD Suppressor Diode TVS Bi-Dir 24V Automotive 3-Pin SC-70 T/R; MF: Nexperia; MP: PESD2CANFD24V-UX; SnapEDA_Link: https://www.snapeda.com/parts/PESD2CANFD24V-UX/Nexperia/view-part/?ref=snap; Package: SC-70-3 Nexperia USA Inc.; Value: *; Check_prices: https://www.snapeda.com/parts/PESD2CANFD24V-UX/Nexperia/view-part/?ref=eda
footprint TVS_PESD2CANFD24V-UX
pins: 1 K1, 2 K2, 3 CC

## PZ1005D100-1R0TF
designator FB?  Impedance @ Frequency: 10Ω@100MHz
Ferrite, 10Ω@100MHz, 0.05Ω, 1000mA, SMD 0402; Manufacturer: Sunlord; Manufacturer Part Number: PZ1005D100-1R0TF; Package Size: 0402; JLCPCB Basic Part: No; JLCPCB Part Number: C96719; Supplier 1: LCSC; Category: Ferrite Beads; Supplier Part Number 1: C96719; Rated Current: 1000mA; DC Resistance: 0.05Ω; RoHS: Yes; ComponentLink1Description: Datasheet; ComponentLink1URL: https://wmsc.lcsc.com/wmsc/upload/file/pdf/v2/lcsc/2310301641_Sunlord-PZ1005D100-1R0TF_C96719.pdf; ComponentLink2Description: JLCPCB Part URL; ComponentLink2URL: https://jlcpcb.com/partdetail/C96719; ComponentLink3Description: LCSC Part URL; ComponentLink3URL: https://lcsc.com/product-detail/Ferrite-Beads_Sunlord-Sunlord-PZ1005D100-1R0TF_C96719.html
footprint FB-0402 (0402 (1005M) Ferrite)
pins: 1, 2

## PZ1005E100-1R8TF
designator FB?  Impedance @ Frequency: 10Ω@100MHz
Ferrite, 10Ω@100MHz, 0.02Ω, 1800mA, SMD 0402; Manufacturer: Sunlord; Manufacturer Part Number: PZ1005E100-1R8TF; Package Size: 0402; JLCPCB Basic Part: No; JLCPCB Part Number: C370054; Supplier 1: LCSC; Category: Ferrite Beads; Supplier Part Number 1: C370054; Rated Current: 1800mA; DC Resistance: 0.02Ω; RoHS: Yes; ComponentLink1Description: Datasheet; ComponentLink1URL: https://wmsc.lcsc.com/wmsc/upload/file/pdf/v2/lcsc/2310301641_Sunlord-PZ1005E100-1R8TF_C370054.pdf; ComponentLink2Description: JLCPCB Part URL; ComponentLink2URL: https://jlcpcb.com/partdetail/C370054; ComponentLink3Description: LCSC Part URL; ComponentLink3URL: https://lcsc.com/product-detail/Ferrite-Beads_Sunlord-Sunlord-PZ1005E100-1R8TF_C370054.html
footprint FB-0402 (0402 (1005M) Ferrite)
pins: 1, 2

## PZ1005E101-R70TF
designator FB?  Impedance @ Frequency: 100Ω@100MHz
Ferrite, 100Ω@100MHz, 0.7A, SMD 0402; Manufacturer: Sunlord; Manufacturer Part Number: PZ1005E101-R70TF; Package Size: 0402; JLCPCB Basic Part: No; JLCPCB Part Number: C2988088; Supplier 1: LCSC; Category: Ferrite Beads; Supplier Part Number 1: C2988088; Rated Current: 0.7A; RoHS: Yes; ComponentLink1Description: Datasheet; ComponentLink1URL: https://wmsc.lcsc.com/wmsc/upload/file/pdf/v2/lcsc/2312261450_Sunlord-PZ1005E101-R70TF_C2988088.pdf; ComponentLink2Description: JLCPCB Part URL; ComponentLink2URL: https://jlcpcb.com/partdetail/C2988088; ComponentLink3Description: LCSC Part URL; ComponentLink3URL: https://lcsc.com/product-detail/Ferrite-Beads_Sunlord-Sunlord-PZ1005E101-R70TF_C2988088.html
footprint FB-0402 (0402 (1005M) Ferrite)
pins: 1, 2

## PZ1005E121-R70TF
designator FB?  Impedance @ Frequency: 120Ω@100MHz
Ferrite, 120Ω@100MHz, ±25%, 0.13Ω, 700mA, SMD 0402; Manufacturer: Sunlord; Manufacturer Part Number: PZ1005E121-R70TF; Package Size: 0402; JLCPCB Basic Part: No; JLCPCB Part Number: C96720; Supplier 1: LCSC; Category: Ferrite Beads; Supplier Part Number 1: C96720; Tolerance: ±25%; Rated Current: 700mA; DC Resistance: 0.13Ω; RoHS: Yes; ComponentLink1Description: Datasheet; ComponentLink1URL: https://wmsc.lcsc.com/wmsc/upload/file/pdf/v2/lcsc/2310301641_Sunlord-PZ1005E121-R70TF_C96720.pdf; ComponentLink2Description: JLCPCB Part URL; ComponentLink2URL: https://jlcpcb.com/partdetail/C96720; ComponentLink3Description: LCSC Part URL; ComponentLink3URL: https://lcsc.com/product-detail/Ferrite-Beads_Sunlord-Sunlord-PZ1005E121-R70TF_C96720.html
footprint FB-0402 (0402 (1005M) Ferrite)
pins: 1, 2

## PZ1005E221-R60TF
designator FB?  Impedance @ Frequency: 220Ω@100MHz
Ferrite, 220Ω@100MHz, ±25%, 0.18Ω, 600mA, SMD 0402; Manufacturer: Sunlord; Manufacturer Part Number: PZ1005E221-R60TF; Package Size: 0402; JLCPCB Basic Part: No; JLCPCB Part Number: C96721; Supplier 1: LCSC; Category: Ferrite Beads; Supplier Part Number 1: C96721; Tolerance: ±25%; Rated Current: 600mA; DC Resistance: 0.18Ω; RoHS: Yes; ComponentLink1Description: Datasheet; ComponentLink1URL: https://wmsc.lcsc.com/wmsc/upload/file/pdf/v2/lcsc/2310301641_Sunlord-PZ1005E221-R60TF_C96721.pdf; ComponentLink2Description: JLCPCB Part URL; ComponentLink2URL: https://jlcpcb.com/partdetail/C96721; ComponentLink3Description: LCSC Part URL; ComponentLink3URL: https://lcsc.com/product-detail/Ferrite-Beads_Sunlord-Sunlord-PZ1005E221-R60TF_C96721.html
footprint FB-0402 (0402 (1005M) Ferrite)
pins: 1, 2

## PZ1005E601-R45TF
designator FB?  Impedance @ Frequency: 600Ω@100MHz
Ferrite, 600Ω@100MHz, ±25%, 0.34Ω, 450mA, SMD 0402; Manufacturer: Sunlord; Manufacturer Part Number: PZ1005E601-R45TF; Package Size: 0402; JLCPCB Basic Part: No; JLCPCB Part Number: C96722; Supplier 1: LCSC; Category: Ferrite Beads; Supplier Part Number 1: C96722; Tolerance: ±25%; Rated Current: 450mA; DC Resistance: 0.34Ω; RoHS: Yes; ComponentLink1Description: Datasheet; ComponentLink1URL: https://wmsc.lcsc.com/wmsc/upload/file/pdf/v2/lcsc/2310301641_Sunlord-PZ1005E601-R45TF_C96722.pdf; ComponentLink2Description: JLCPCB Part URL; ComponentLink2URL: https://jlcpcb.com/partdetail/C96722; ComponentLink3Description: LCSC Part URL; ComponentLink3URL: https://lcsc.com/product-detail/Ferrite-Beads_Sunlord-Sunlord-PZ1005E601-R45TF_C96722.html
footprint FB-0402 (0402 (1005M) Ferrite)
pins: 1, 2

## PZ1005U121-1R0TF
designator FB?  Impedance @ Frequency: 120Ω@100MHz
Ferrite, 120Ω@100MHz, ±25%, 0.12Ω, 1000mA, SMD 0402; Manufacturer: Sunlord; Manufacturer Part Number: PZ1005U121-1R0TF; Package Size: 0402; JLCPCB Basic Part: No; JLCPCB Part Number: C96723; Supplier 1: LCSC; Category: Ferrite Beads; Supplier Part Number 1: C96723; Tolerance: ±25%; Rated Current: 1000mA; DC Resistance: 0.12Ω; RoHS: Yes; ComponentLink1Description: Datasheet; ComponentLink1URL: https://wmsc.lcsc.com/wmsc/upload/file/pdf/v2/lcsc/2310301641_Sunlord-PZ1005U121-1R0TF_C96723.pdf; ComponentLink2Description: JLCPCB Part URL; ComponentLink2URL: https://jlcpcb.com/partdetail/C96723; ComponentLink3Description: LCSC Part URL; ComponentLink3URL: https://lcsc.com/product-detail/Ferrite-Beads_Sunlord-Sunlord-PZ1005U121-1R0TF_C96723.html
footprint FB-0402 (0402 (1005M) Ferrite)
pins: 1, 2

## PZ1005U221-R80TF
designator FB?  Impedance @ Frequency: 220Ω@100MHz
Ferrite, 220Ω@100MHz, ±25%, 0.18Ω, 800mA, SMD 0402; Manufacturer: Sunlord; Manufacturer Part Number: PZ1005U221-R80TF; Package Size: 0402; JLCPCB Basic Part: No; JLCPCB Part Number: C96724; Supplier 1: LCSC; Category: Ferrite Beads; Supplier Part Number 1: C96724; Tolerance: ±25%; Rated Current: 800mA; DC Resistance: 0.18Ω; RoHS: Yes; ComponentLink1Description: Datasheet; ComponentLink1URL: https://wmsc.lcsc.com/wmsc/upload/file/pdf/v2/lcsc/2310301641_Sunlord-PZ1005U221-R80TF_C96724.pdf; ComponentLink2Description: JLCPCB Part URL; ComponentLink2URL: https://jlcpcb.com/partdetail/C96724; ComponentLink3Description: LCSC Part URL; ComponentLink3URL: https://lcsc.com/product-detail/Ferrite-Beads_Sunlord-Sunlord-PZ1005U221-R80TF_C96724.html
footprint FB-0402 (0402 (1005M) Ferrite)
pins: 1, 2

## PZ1005U301-R60TF
designator FB?  Impedance @ Frequency: 300Ω@100MHz
Ferrite, 300Ω@100MHz, ±25%, 0.6A, SMD 0402; Manufacturer: Sunlord; Manufacturer Part Number: PZ1005U301-R60TF; Package Size: 0402; JLCPCB Basic Part: No; JLCPCB Part Number: C316422; Supplier 1: LCSC; Category: Ferrite Beads; Supplier Part Number 1: C316422; Tolerance: ±25%; Rated Current: 0.6A; RoHS: Yes; ComponentLink1Description: Datasheet; ComponentLink1URL: https://wmsc.lcsc.com/wmsc/upload/file/pdf/v2/lcsc/2310301641_Sunlord-PZ1005U301-R60TF_C316422.pdf; ComponentLink2Description: JLCPCB Part URL; ComponentLink2URL: https://jlcpcb.com/partdetail/C316422; ComponentLink3Description: LCSC Part URL; ComponentLink3URL: https://lcsc.com/product-detail/Ferrite-Beads_Sunlord-Sunlord-PZ1005U301-R60TF_C316422.html
footprint FB-0402 (0402 (1005M) Ferrite)
pins: 1, 2

## PZ1005U601-R45TF
designator FB?  Impedance @ Frequency: 600Ω@100MHz
Ferrite, 600Ω@100MHz, ±25%, 0.34Ω, 450mA, SMD 0402; Manufacturer: Sunlord; Manufacturer Part Number: PZ1005U601-R45TF; Package Size: 0402; JLCPCB Basic Part: No; JLCPCB Part Number: C96725; Supplier 1: LCSC; Category: Ferrite Beads; Supplier Part Number 1: C96725; Tolerance: ±25%; Rated Current: 450mA; DC Resistance: 0.34Ω; RoHS: Yes; ComponentLink1Description: Datasheet; ComponentLink1URL: https://wmsc.lcsc.com/wmsc/upload/file/pdf/v2/lcsc/2310301641_Sunlord-PZ1005U601-R45TF_C96725.pdf; ComponentLink2Description: JLCPCB Part URL; ComponentLink2URL: https://jlcpcb.com/partdetail/C96725; ComponentLink3Description: LCSC Part URL; ComponentLink3URL: https://lcsc.com/product-detail/Ferrite-Beads_Sunlord-Sunlord-PZ1005U601-R45TF_C96725.html
footprint FB-0402 (0402 (1005M) Ferrite)
pins: 1, 2

## PZ1005U601-R50TF
designator FB?  Impedance @ Frequency: 600Ω@100MHz
Ferrite, 600Ω@100MHz, ±25%, 0.5A, SMD 0402; Manufacturer: Sunlord; Manufacturer Part Number: PZ1005U601-R50TF; Package Size: 0402; JLCPCB Basic Part: No; JLCPCB Part Number: C279849; Supplier 1: LCSC; Category: Ferrite Beads; Supplier Part Number 1: C279849; Tolerance: ±25%; Rated Current: 0.5A; RoHS: Yes; ComponentLink1Description: Datasheet; ComponentLink1URL: https://wmsc.lcsc.com/wmsc/upload/file/pdf/v2/lcsc/2310301641_Sunlord-PZ1005U601-R50TF_C279849.pdf; ComponentLink2Description: JLCPCB Part URL; ComponentLink2URL: https://jlcpcb.com/partdetail/C279849; ComponentLink3Description: LCSC Part URL; ComponentLink3URL: https://lcsc.com/product-detail/Ferrite-Beads_Sunlord-Sunlord-PZ1005U601-R50TF_C279849.html
footprint FB-0402 (0402 (1005M) Ferrite)
pins: 1, 2

## SBH1005S121NSP
designator FB?  Impedance @ Frequency: 120Ω@100MHz
Ferrite, 120Ω@100MHz, ±25%, 95mΩ, 2A, SMD 0402; Manufacturer: Sunltech Tech; Manufacturer Part Number: SBH1005S121NSP; Package Size: 0402; JLCPCB Basic Part: No; JLCPCB Part Number: C216140; Supplier 1: LCSC; Category: Ferrite Beads; Supplier Part Number 1: C216140; Tolerance: ±25%; Rated Current: 2A; DC Resistance: 95mΩ; RoHS: Yes; ComponentLink1Description: Datasheet; ComponentLink1URL: https://wmsc.lcsc.com/wmsc/upload/file/pdf/v2/lcsc/2304140030_Sunltech-Tech-SBH1005S121NSP_C216140.pdf; ComponentLink2Description: JLCPCB Part URL; ComponentLink2URL: https://jlcpcb.com/partdetail/C216140; ComponentLink3Description: LCSC Part URL; ComponentLink3URL: https://lcsc.com/product-detail/Ferrite-Beads_Sunltech-Tech-Sunltech-Tech-SBH1005S121NSP_C216140.html
footprint FB-0402 (0402 (1005M) Ferrite)
pins: 1, 2

## SBH1005S221JSP
designator FB?  Impedance @ Frequency: 220Ω@100MHz
Ferrite, 220Ω@100MHz, ±25%, 700mΩ, 800mA, SMD 0402; Manufacturer: Sunltech Tech; Manufacturer Part Number: SBH1005S221JSP; Package Size: 0402; JLCPCB Basic Part: No; JLCPCB Part Number: C216141; Supplier 1: LCSC; Category: Ferrite Beads; Supplier Part Number 1: C216141; Tolerance: ±25%; Rated Current: 800mA; DC Resistance: 700mΩ; RoHS: Yes; ComponentLink1Description: Datasheet; ComponentLink1URL: https://wmsc.lcsc.com/wmsc/upload/file/pdf/v2/lcsc/1809041633_Sunltech-Tech-SBH1005S221JSP_C216141.pdf; ComponentLink2Description: JLCPCB Part URL; ComponentLink2URL: https://jlcpcb.com/partdetail/C216141; ComponentLink3Description: LCSC Part URL; ComponentLink3URL: https://lcsc.com/product-detail/Ferrite-Beads_Sunltech-Tech-Sunltech-Tech-SBH1005S221JSP_C216141.html
footprint FB-0402 (0402 (1005M) Ferrite)
pins: 1, 2

## SBH1005S300PSP
designator FB?  Impedance @ Frequency: 30Ω@100MHz
Ferrite, 30Ω@100MHz, ±25%, 60mΩ, 2.5A, SMD 0402; Manufacturer: Sunltech Tech; Manufacturer Part Number: SBH1005S300PSP; Package Size: 0402; JLCPCB Basic Part: No; JLCPCB Part Number: C216138; Supplier 1: LCSC; Category: Ferrite Beads; Supplier Part Number 1: C216138; Tolerance: ±25%; Rated Current: 2.5A; DC Resistance: 60mΩ; RoHS: Yes; ComponentLink1Description: Datasheet; ComponentLink1URL: https://wmsc.lcsc.com/wmsc/upload/file/pdf/v2/lcsc/2304140030_Sunltech-Tech-SBH1005S300PSP_C216138.pdf; ComponentLink2Description: JLCPCB Part URL; ComponentLink2URL: https://jlcpcb.com/partdetail/C216138; ComponentLink3Description: LCSC Part URL; ComponentLink3URL: https://lcsc.com/product-detail/Ferrite-Beads_Sunltech-Tech-Sunltech-Tech-SBH1005S300PSP_C216138.html
footprint FB-0402 (0402 (1005M) Ferrite)
pins: 1, 2

## SBH1005S600PSP
designator FB?  Impedance @ Frequency: 60Ω@100MHz
Ferrite, 60Ω@100MHz, ±25%, 70mΩ, 2.5A, SMD 0402; Manufacturer: Sunltech Tech; Manufacturer Part Number: SBH1005S600PSP; Package Size: 0402; JLCPCB Basic Part: No; JLCPCB Part Number: C216139; Supplier 1: LCSC; Category: Ferrite Beads; Supplier Part Number 1: C216139; Tolerance: ±25%; Rated Current: 2.5A; DC Resistance: 70mΩ; RoHS: Yes; ComponentLink1Description: Datasheet; ComponentLink1URL: https://wmsc.lcsc.com/wmsc/upload/file/pdf/v2/lcsc/2304140030_Sunltech-Tech-SBH1005S600PSP_C216139.pdf; ComponentLink2Description: JLCPCB Part URL; ComponentLink2URL: https://jlcpcb.com/partdetail/C216139; ComponentLink3Description: LCSC Part URL; ComponentLink3URL: https://lcsc.com/product-detail/Ferrite-Beads_Sunltech-Tech-Sunltech-Tech-SBH1005S600PSP_C216139.html
footprint FB-0402 (0402 (1005M) Ferrite)
pins: 1, 2

## SBJ100505T-121Y-N
designator FB?  Impedance @ Frequency: 120Ω@100MHz
Ferrite, 120Ω@100MHz, 250mΩ, 500mA, SMD 0402; Manufacturer: Chilisin Elec; Manufacturer Part Number: SBJ100505T-121Y-N; Package Size: 0402; JLCPCB Basic Part: No; JLCPCB Part Number: C3033272; Supplier 1: LCSC; Category: Ferrite Beads; Supplier Part Number 1: C3033272; Rated Current: 500mA; DC Resistance: 250mΩ; RoHS: Yes; ComponentLink1Description: Datasheet; ComponentLink1URL: https://wmsc.lcsc.com/wmsc/upload/file/pdf/v2/lcsc/2209140930_Chilisin-Elec-SBJ100505T-121Y-N_C3033272.pdf; ComponentLink2Description: JLCPCB Part URL; ComponentLink2URL: https://jlcpcb.com/partdetail/C3033272; ComponentLink3Description: LCSC Part URL; ComponentLink3URL: https://lcsc.com/product-detail/Ferrite-Beads_Chilisin-Elec-Chilisin-Elec-SBJ100505T-121Y-N_C3033272.html
footprint FB-0402 (0402 (1005M) Ferrite)
pins: 1, 2

## SBJ100505T-182Y-N
designator FB?  Impedance @ Frequency: 1800Ω@100MHz
Ferrite, 1800Ω@100MHz, ±25%, 1.4Ω, 100mA, SMD 0402; Manufacturer: Chilisin Elec; Manufacturer Part Number: SBJ100505T-182Y-N; Package Size: 0402; JLCPCB Basic Part: No; JLCPCB Part Number: C280681; Supplier 1: LCSC; Category: Ferrite Beads; Supplier Part Number 1: C280681; Tolerance: ±25%; Rated Current: 100mA; DC Resistance: 1.4Ω; RoHS: Yes; ComponentLink1Description: Datasheet; ComponentLink1URL: https://wmsc.lcsc.com/wmsc/upload/file/pdf/v2/lcsc/1912111437_Chilisin-Elec-SBJ100505T-182Y-N_C280681.pdf; ComponentLink2Description: JLCPCB Part URL; ComponentLink2URL: https://jlcpcb.com/partdetail/C280681; ComponentLink3Description: LCSC Part URL; ComponentLink3URL: https://lcsc.com/product-detail/Ferrite-Beads_Chilisin-Elec-Chilisin-Elec-SBJ100505T-182Y-N_C280681.html
footprint FB-0402 (0402 (1005M) Ferrite)
pins: 1, 2

## SBJ100505T-301Y-N
designator FB?  Impedance @ Frequency: 300Ω@100MHz
Ferrite, 300Ω@100MHz, ±25%, 0.5Ω, 300mA, SMD 0402; Manufacturer: Chilisin Elec; Manufacturer Part Number: SBJ100505T-301Y-N; Package Size: 0402; JLCPCB Basic Part: No; JLCPCB Part Number: C285657; Supplier 1: LCSC; Category: Ferrite Beads; Supplier Part Number 1: C285657; Tolerance: ±25%; Rated Current: 300mA; DC Resistance: 0.5Ω; RoHS: Yes; ComponentLink1Description: Datasheet; ComponentLink1URL: https://wmsc.lcsc.com/wmsc/upload/file/pdf/v2/lcsc/2304140030_Chilisin-Elec-SBJ100505T-301Y-N_C285657.pdf; ComponentLink2Description: JLCPCB Part URL; ComponentLink2URL: https://jlcpcb.com/partdetail/C285657; ComponentLink3Description: LCSC Part URL; ComponentLink3URL: https://lcsc.com/product-detail/Ferrite-Beads_Chilisin-Elec-Chilisin-Elec-SBJ100505T-301Y-N_C285657.html
footprint FB-0402 (0402 (1005M) Ferrite)
pins: 1, 2

## SBJ100505T-601Y-N
designator FB?  Impedance @ Frequency: 600Ω@100MHz
Ferrite, 600Ω@100MHz, ±25%, 0.6Ω, 300mA, SMD 0402; Manufacturer: Chilisin Elec; Manufacturer Part Number: SBJ100505T-601Y-N; Package Size: 0402; JLCPCB Basic Part: No; JLCPCB Part Number: C142038; Supplier 1: LCSC; Category: Ferrite Beads; Supplier Part Number 1: C142038; Tolerance: ±25%; Rated Current: 300mA; DC Resistance: 0.6Ω; RoHS: Yes; ComponentLink1Description: Datasheet; ComponentLink1URL: https://wmsc.lcsc.com/wmsc/upload/file/pdf/v2/lcsc/2304140030_Chilisin-Elec-SBJ100505T-601Y-N_C142038.pdf; ComponentLink2Description: JLCPCB Part URL; ComponentLink2URL: https://jlcpcb.com/partdetail/C142038; ComponentLink3Description: LCSC Part URL; ComponentLink3URL: https://lcsc.com/product-detail/Ferrite-Beads_Chilisin-Elec-Chilisin-Elec-SBJ100505T-601Y-N_C142038.html
footprint FB-0402 (0402 (1005M) Ferrite)
pins: 1, 2

## SBM1005G121GSP
designator FB?  Impedance @ Frequency: 120Ω@100MHz
Ferrite, 120Ω@100MHz, ±25%, 800mΩ, 200mA, SMD 0402; Manufacturer: Sunltech Tech; Manufacturer Part Number: SBM1005G121GSP; Package Size: 0402; JLCPCB Basic Part: No; JLCPCB Part Number: C216125; Supplier 1: LCSC; Category: Ferrite Beads; Supplier Part Number 1: C216125; Tolerance: ±25%; Rated Current: 200mA; DC Resistance: 800mΩ; RoHS: Yes; ComponentLink1Description: Datasheet; ComponentLink2Description: JLCPCB Part URL; ComponentLink2URL: https://jlcpcb.com/partdetail/C216125; ComponentLink3Description: LCSC Part URL; ComponentLink3URL: https://lcsc.com/product-detail/Ferrite-Beads_Sunltech-Tech-Sunltech-Tech-SBM1005G121GSP_C216125.html
footprint FB-0402 (0402 (1005M) Ferrite)
pins: 1, 2

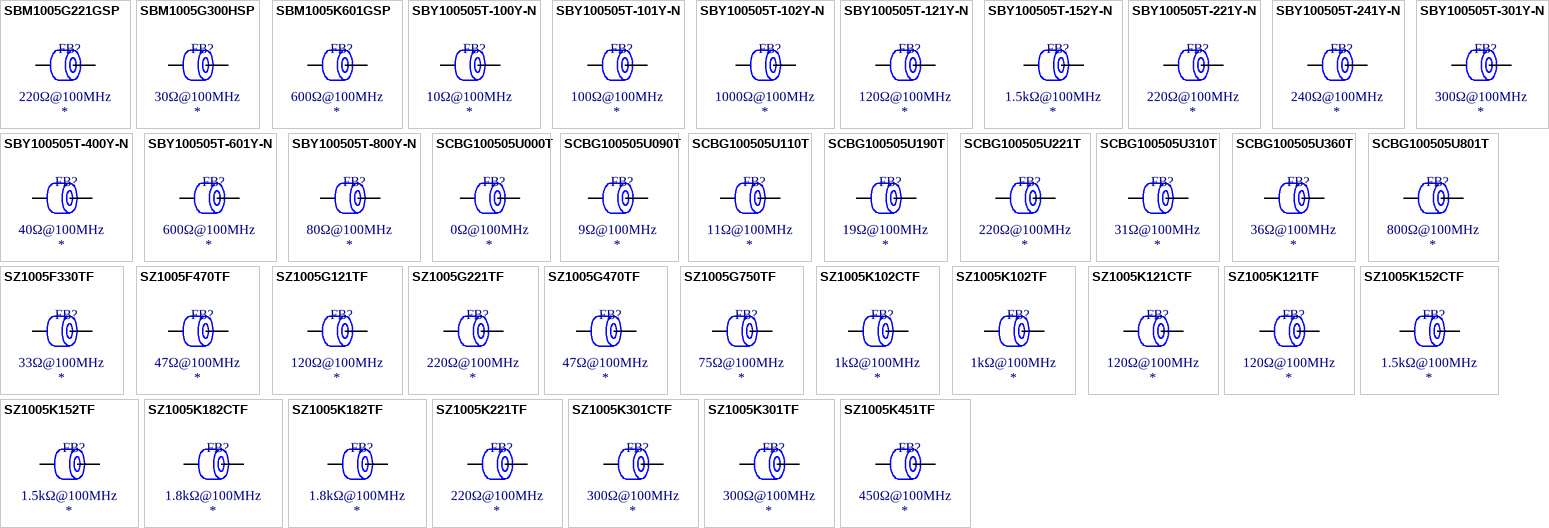
[diagram p19: symbols SBM1005G221GSP to SZ1005K451TF]

## SBM1005G221GSP
designator FB?  Impedance @ Frequency: 220Ω@100MHz
Ferrite, 220Ω@100MHz, ±25%, 700mΩ, 500mA, SMD 0402; Manufacturer: Sunltech Tech; Manufacturer Part Number: SBM1005G221GSP; Package Size: 0402; JLCPCB Basic Part: No; JLCPCB Part Number: C216126; Supplier 1: LCSC; Category: Ferrite Beads; Supplier Part Number 1: C216126; Tolerance: ±25%; Rated Current: 500mA; DC Resistance: 700mΩ; RoHS: Yes; ComponentLink1Description: Datasheet; ComponentLink1URL: https://wmsc.lcsc.com/wmsc/upload/file/pdf/v2/lcsc/2304140030_Sunltech-Tech-SBM1005G221GSP_C216126.pdf; ComponentLink2Description: JLCPCB Part URL; ComponentLink2URL: https://jlcpcb.com/partdetail/C216126; ComponentLink3Description: LCSC Part URL; ComponentLink3URL: https://lcsc.com/product-detail/Ferrite-Beads_Sunltech-Tech-Sunltech-Tech-SBM1005G221GSP_C216126.html
footprint FB-0402 (0402 (1005M) Ferrite)
pins: 1, 2